# EAGLE library part TWOTREES_TMC2209_V20 (library TWOTREES_TMC2209_V20)
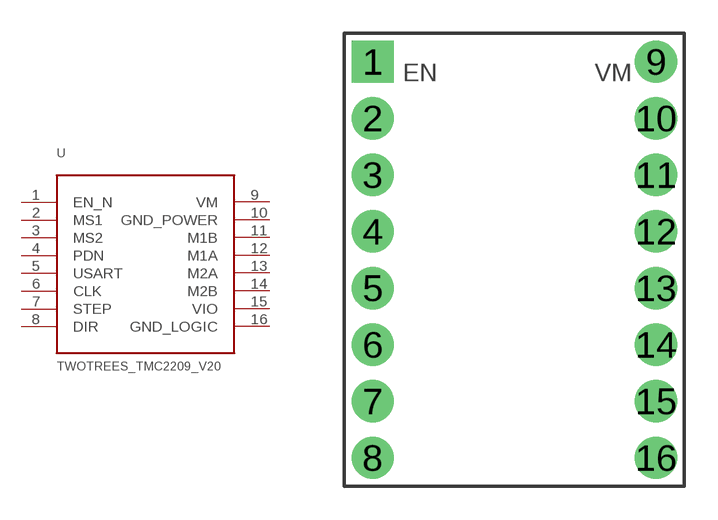
[diagram p0: symbol with the pads of TWOTREES_TMC2209_V20_SOCKET_2X8; footprint TWOTREES_TMC2209_V20_SOCKET_2X8]

Designator prefix U

## TWOTREES_TMC2209_V20  [TWOTREES_TMC2209_V20_SOCKET_2X8]
1  EN_N  in
2  MS1  in
3  MS2  in
4  PDN  pas
5  USART  pas
6  CLK  pas
7  STEP  in
8  DIR  in
9  VM  pwr
10  GND_POWER  pas
11  M1B  out
12  M1A  out
13  M2A  out
14  M2B  out
15  VIO  pwr
16  GND_LOGIC  pas

## Footprint TWOTREES_TMC2209_V20_SOCKET_2X8 (pad centres in mm)
drill 1 pad 1.9 square: 1 -6.35,8.89
drill 1 pad 1.9 round: 2 -6.35,6.35; 3 -6.35,3.81; 4 -6.35,1.27; 5 -6.35,-1.27; 6 -6.35,-3.81; 7 -6.35,-6.35; 8 -6.35,-8.89; 9 6.35,8.89; 10 6.35,6.35; 11 6.35,3.81; 12 6.35,1.27; 13 6.35,-1.27; 14 6.35,-3.81; 15 6.35,-6.35; 16 6.35,-8.89